# Altium footprint library laboE_altium.PcbLib: 676 footprints (part 25 of 43)
Each footprint in its own frame and in the unit in brackets; x right, y up, seen from the top. Pads: shape width x height; smd on the part's side, far side on the other; paste and mask are expansions set on the pad; w line width, h text height; cw(c..) or ccw(c..) is an arc to the next point about the centre after c.
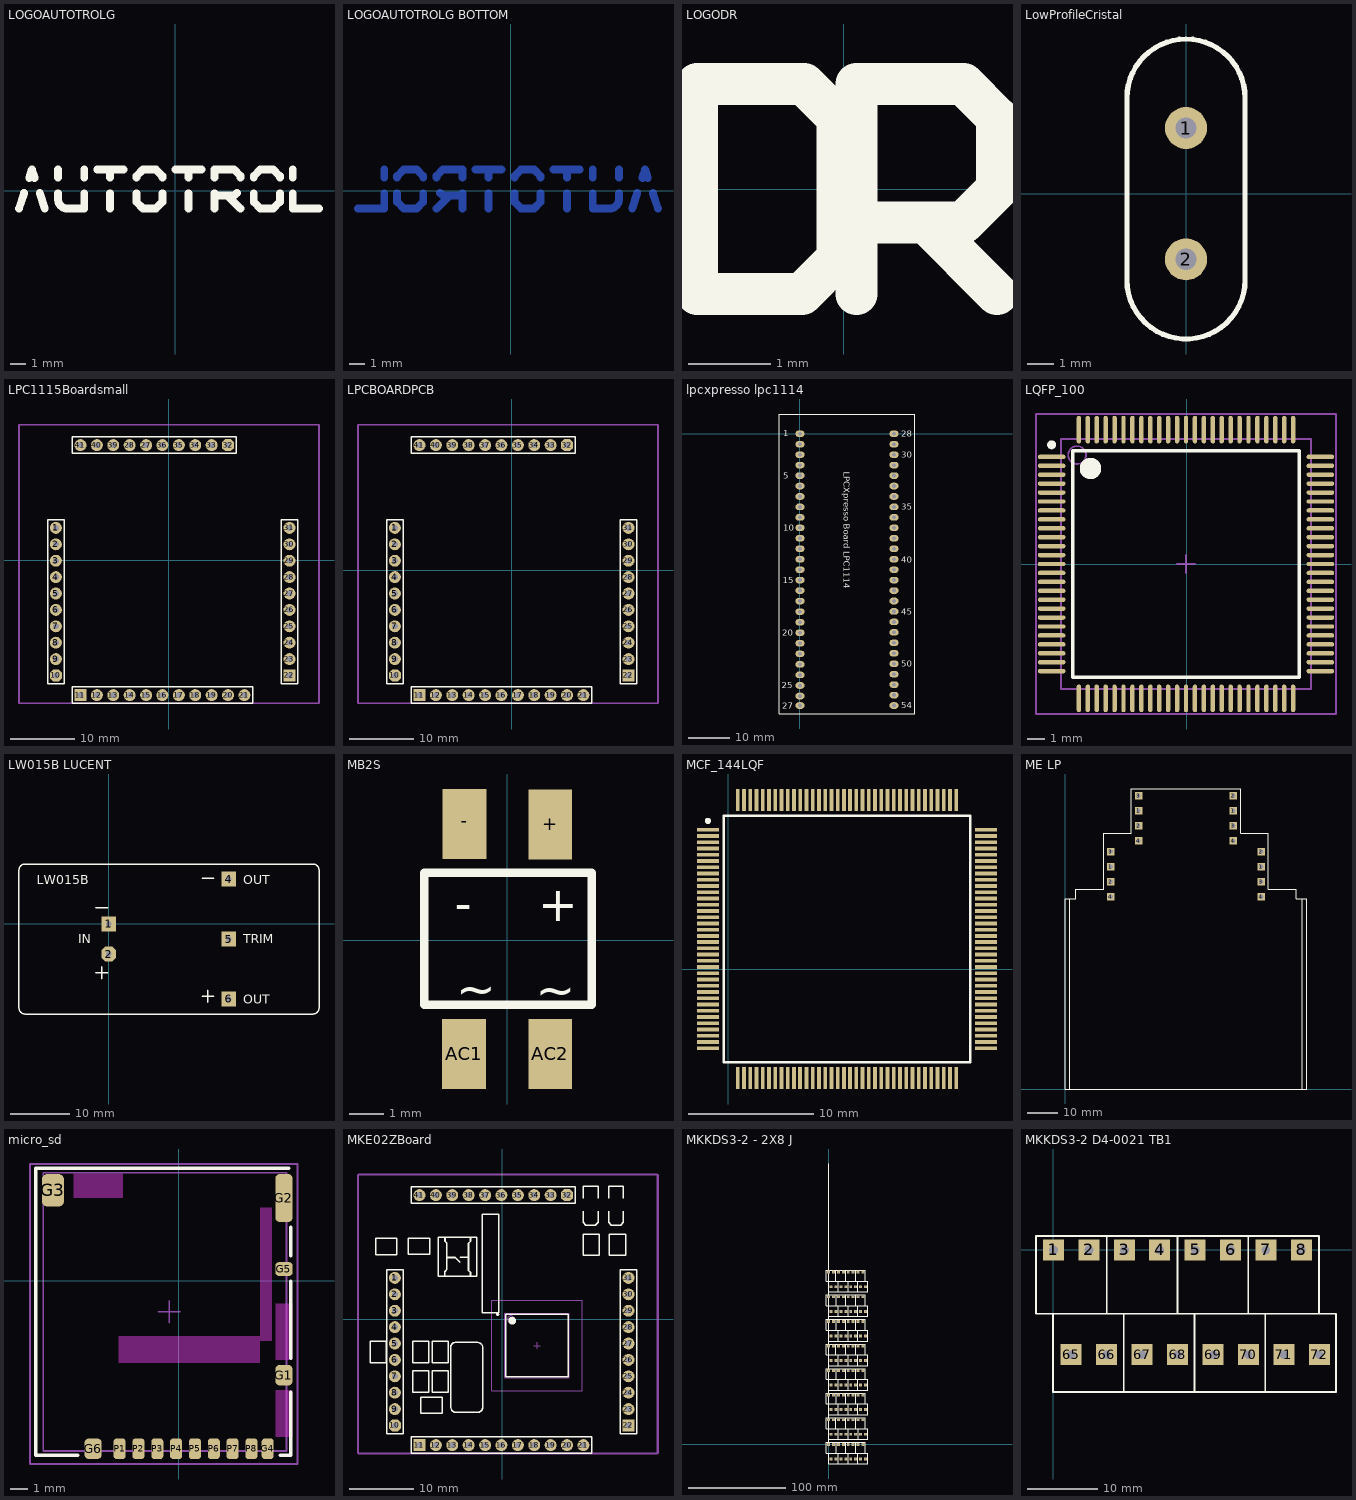
[diagram p24: the footprints below, top view; thin cyan lines are the x and y axes]

## LOGOAUTOTROLG [mm]
Top Overlay:
  lines w0.508: -10.16,-1.143 -9.83,-0.127 ; -9.5,0.838 -9.322,1.397 -9.144,0.838 ; -8.814,-0.127 -8.484,-1.143 ; -7.62,-0.559 -7.62,-0.152 ; -7.62,0.864 -7.62,1.397 ; -7.611,-0.534 ccw(c-7.036,-0.567) -7.036,-1.143 -5.918,-1.143 -5.918,-0.152 ; -5.918,0.864 -5.918,1.397 ; -5.08,1.397 -3.378,1.397 ; -4.242,-1.143 -4.242,-0.152 ; -4.242,0.864 -4.242,1.397 ; -2.54,-0.711 -2.108,-1.143 ; -2.54,-0.686 -2.54,-0.152 ; -2.54,0.864 -2.54,0.94 ; -2.54,0.965 -2.108,1.397 -1.295,1.397 ; -2.083,-1.143 -1.27,-1.143 -0.838,-0.711 ; -1.27,1.397 -0.838,0.965 ; -0.838,-0.686 -0.838,-0.152 ; -0.838,0.864 -0.838,0.94 ; 0,1.397 1.702,1.397 ; 0.838,-1.143 0.838,-0.152 ; 0.838,0.864 0.838,1.397 ; 2.54,-1.143 2.54,-0.152 ; 2.54,-0.305 3.81,-0.305 3.988,-0.127 ; 2.54,0.864 2.54,1.397 3.81,1.397 4.216,0.991 4.216,0.864 ; 3.404,-0.33 4.216,-1.143 ; 5.08,-0.711 5.512,-1.143 ; 5.08,-0.686 5.08,-0.152 ; 5.08,0.864 5.08,0.94 ; 5.08,0.965 5.512,1.397 6.325,1.397 ; 5.537,-1.143 6.35,-1.143 6.782,-0.711 ; 6.35,1.397 6.782,0.965 ; 6.782,-0.686 6.782,-0.152 ; 6.782,0.864 6.782,0.94 ; 7.62,-0.152 7.62,-1.143 9.322,-1.143 ; 7.62,0.864 7.62,1.397

## LOGOAUTOTROLG BOTTOM [mm]
height 23.3
Bottom Layer:
  lines w0.508: -9.922,-1.143 -8.22,-1.143 -8.22,-0.152 ; -8.22,0.864 -8.22,1.397 ; -7.382,-0.711 -6.95,-1.143 -6.137,-1.143 ; -7.382,-0.686 -7.382,-0.152 ; -7.382,0.864 -7.382,0.94 ; -7.382,0.965 -6.95,1.397 ; -6.925,1.397 -6.112,1.397 -5.68,0.965 ; -6.112,-1.143 -5.68,-0.711 ; -5.68,-0.686 -5.68,-0.152 ; -5.68,0.864 -5.68,0.94 ; -4.816,-1.143 -4.004,-0.33 ; -4.816,0.864 -4.816,0.991 -4.41,1.397 -3.14,1.397 -3.14,0.864 ; -4.588,-0.127 -4.41,-0.305 -3.14,-0.305 ; -3.14,-1.143 -3.14,-0.152 ; -2.302,1.397 -0.6,1.397 ; -1.438,-1.143 -1.438,-0.152 ; -1.438,0.864 -1.438,1.397 ; 0.238,-0.711 0.67,-1.143 1.483,-1.143 ; 0.238,-0.686 0.238,-0.152 ; 0.238,0.864 0.238,0.94 ; 0.238,0.965 0.67,1.397 ; 0.695,1.397 1.508,1.397 1.94,0.965 ; 1.508,-1.143 1.94,-0.711 ; 1.94,-0.686 1.94,-0.152 ; 1.94,0.864 1.94,0.94 ; 2.778,1.397 4.48,1.397 ; 3.642,-1.143 3.642,-0.152 ; 3.642,0.864 3.642,1.397 ; 5.318,-0.152 5.318,-1.143 6.436,-1.143 ccw(c6.436,-0.567) 7.011,-0.534 ; 5.318,0.864 5.318,1.397 ; 7.02,-0.559 7.02,-0.152 ; 7.02,0.864 7.02,1.397 ; 7.884,-1.143 8.214,-0.127 ; 8.544,0.838 8.722,1.397 8.9,0.838 ; 9.23,-0.127 9.56,-1.143

## LOGODR [mm]
Top Overlay:
  lines w0.508: -0.508,1.27 -1.778,1.27 -1.778,-1.27 -0.508,-1.27 -0.076,-0.838 -0.076,0.864 -0.483,1.27 ; 0.152,-1.27 0.152,1.27 1.422,1.27 ; 0.356,-0.406 1.448,-0.406 1.854,0 1.854,0.864 1.448,1.27 ; 0.991,-0.406 1.854,-1.27

## LowProfileCristal [mm]
pads (2):
  round 1.6 hole 0.813: 1(0,2.5) 2(0,-2.5)
Top Overlay:
  lines w0.2: -2.25,-3.294 ccw(c0,-3.282) 2.25,-3.29 2.25,3.625 ccw(c0,3.638) -2.25,3.625 -2.25,-3.294
3D body: height 1, standoff 0, extent -2.277,-5.586 2.2,5.916
3D body: height 4, standoff 1, extent -2.044,-5.368 1.98,5.669

## LPC1115Boardsmall [mm]
pads (41):
  round 1.85 hole 0.9 paste+0: 1(-17.45,4.978) 2(-17.45,2.438) 3(-17.45,-0.102) 4(-17.45,-2.642) 5(-17.45,-5.182) 6(-17.45,-7.722) 7(-17.45,-10.262) 8(-17.45,-12.802) 9(-17.45,-15.342) 27(-3.48,17.805) 28(-6.02,17.805) 33(6.68,17.805) 34(4.14,17.805) 35(1.6,17.805) 36(-0.94,17.805) 39(-8.56,17.805) 40(-11.1,17.805) 41(-13.64,17.805)
  oct 1.85x1.85 hole 0.9: 10(-17.45,-17.882)
  rect 1.85x1.85 hole 0.9: 11(-13.64,-20.93) 22(18.745,-17.882)
  round 1.85 hole 0.9: 12(-11.1,-20.93) 13(-8.56,-20.93) 14(-6.02,-20.93) 15(-3.48,-20.93) 16(-0.94,-20.93) 17(1.6,-20.93) 18(4.14,-20.93) 19(6.68,-20.93) 20(9.22,-20.93) 21(11.76,-20.93) 23(18.745,-15.342) 24(18.745,-12.802) 25(18.745,-10.262) 26(18.745,-7.722) 27(18.745,-5.182) 28(18.745,-2.642) 29(18.745,-0.102) 30(18.745,2.438) 31(18.745,4.978)
  oct 1.85x1.85 hole 0.9 paste+0: 32(9.22,17.805)
Top Layer:
  lines w0.5: -17.704,-12.802 cw(c-17.577,-12.802) -17.577,-12.675 ; -17.704,-10.262 cw(c-17.577,-10.262) -17.577,-10.135
Top Overlay:
  lines w0.2: -18.72,-19.152 -18.72,6.248 -16.18,6.248 -16.18,-17.247 -16.18,-19.152 -18.72,-19.152 ; -14.91,-22.2 13.03,-22.2 13.03,-19.66 -13.005,-19.66 -14.91,-19.66 -14.91,-22.2 ; -14.91,16.535 8.585,16.535 10.49,16.535 10.49,19.075 -14.91,19.075 -14.91,16.535 ; 17.475,-19.152 20.015,-19.152 20.015,6.248 17.475,6.248 17.475,-17.247 17.475,-19.152
Mechanical 1:
  lines w0.254: -17.45,-22.2 20.015,-22.2 ; -13.64,17.805 -13.386,17.805 -13.132,18.059 ; -23.165,-22.2 -23.165,20.98 23.317,20.98 23.317,-22.2 -23.165,-22.2
3D body: height 7.35, standoff 7.25, extent 0.435,-3.299 0.835,-2.899
3D body: height 7, standoff 6, extent 5.847,-10.897 6.147,-9.144
3D body: height 7, standoff 6, extent 5.362,-10.884 5.662,-9.131
3D body: height 7, standoff 6, extent 4.854,-10.897 5.154,-9.144
3D body: height 7, standoff 6, extent 4.346,-10.897 4.646,-9.144
3D body: height 7, standoff 6, extent 3.838,-10.897 4.138,-9.144
3D body: height 7, standoff 6, extent 3.358,-10.897 3.658,-9.144
3D body: height 7, standoff 6, extent 2.847,-10.897 3.147,-9.144
3D body: height 7, standoff 6, extent 2.339,-10.897 2.639,-9.144
3D body: height 7, standoff 6, extent 1.857,-10.897 2.157,-9.144
3D body: height 7, standoff 6, extent 1.349,-10.897 1.649,-9.144
3D body: height 7, standoff 6, extent 0.838,-10.897 1.138,-9.144
3D body: height 7, standoff 6, extent 0.356,-10.897 0.656,-9.144
3D body: height 6.25, standoff 6, extent 5.844,-2.007 6.144,-0.254
3D body: height 6.25, standoff 6, extent 5.336,-2.007 5.636,-0.254
3D body: height 6.25, standoff 6, extent 4.854,-2.007 5.154,-0.254
3D body: height 6.25, standoff 6, extent 4.346,-2.007 4.646,-0.254
3D body: height 6.25, standoff 6, extent 3.863,-2.007 4.163,-0.254
3D body: height 6.25, standoff 6, extent 3.355,-2.007 3.655,-0.254
3D body: height 6.25, standoff 6, extent 2.845,-2.007 3.145,-0.254
3D body: height 6.25, standoff 6, extent 2.365,-2.007 2.665,-0.254
3D body: height 6.25, standoff 6, extent 1.857,-2.007 2.157,-0.254
3D body: height 6.25, standoff 6, extent 1.349,-2.007 1.649,-0.254
3D body: height 6.25, standoff 6, extent 0.866,-2.007 1.166,-0.254
3D body: height 6.25, standoff 6, extent 0.335,-2.007 0.635,-0.254
3D body: height 7, standoff 6, extent 6.782,-8.456 8.534,-8.156
3D body: height 7, standoff 6, extent 6.782,-7.976 8.534,-7.676
3D body: height 7, standoff 6, extent 6.782,-7.465 8.534,-7.165
3D body: height 7, standoff 6, extent 6.795,-6.957 8.547,-6.657
3D body: height 7, standoff 6, extent 6.795,-6.475 8.547,-6.175
3D body: height 7, standoff 6, extent 6.794,-5.969 8.547,-5.669
3D body: height 7, standoff 6, extent 6.794,-5.461 8.547,-5.161
3D body: height 7, standoff 6, extent 6.795,-4.951 8.547,-4.651
3D body: height 7, standoff 6, extent 6.795,-4.468 8.547,-4.168
3D body: height 7, standoff 6, extent 6.795,-3.96 8.547,-3.66
3D body: height 7, standoff 6, extent 6.782,-3.454 8.534,-3.154
3D body: height 6.25, standoff 6, extent 6.794,-2.972 8.547,-2.672
3D body: height 7, standoff 6, extent -2.032,-2.972 -0.279,-2.672
3D body: height 7, standoff 6, extent -2.032,-3.454 -0.279,-3.154
3D body: height 7, standoff 6, extent -2.032,-3.962 -0.279,-3.662
3D body: height 7, standoff 6, extent -2.032,-4.468 -0.279,-4.168
3D body: height 7, standoff 6, extent -2.032,-4.953 -0.279,-4.653
3D body: height 7, standoff 6, extent -2.032,-5.459 -0.279,-5.159
3D body: height 7, standoff 6, extent -2.032,-5.967 -0.279,-5.667
3D body: height 7, standoff 6, extent -2.032,-6.475 -0.279,-6.175
3D body: height 7, standoff 6, extent -2.032,-6.957 -0.279,-6.657
3D body: height 7, standoff 6, extent -2.032,-7.465 -0.279,-7.165
3D body: height 7, standoff 6, extent -2.032,-7.95 -0.279,-7.65
3D body: height 7, standoff 6, extent -2.032,-8.453 -0.279,-8.153
3D body: height 11.1, standoff 8.1, extent 3.613,4.325 4.413,5.125
3D body: height 11.1, standoff 8.1, extent 3.613,6.865 4.413,7.665
3D body: height 11.1, standoff 8.1, extent 3.613,9.405 4.413,10.205
3D body: height 11.1, standoff 8.1, extent 3.613,11.945 4.413,12.745
3D body: height 11.1, standoff 8.1, extent 3.613,14.485 4.413,15.285
3D body: height 8, standoff 6, extent 2.876,3.404 5.15,16.002
3D body: height 7, standoff 6, extent -16.972,7.681 -10.962,13.691
3D body: height 8.9, standoff 8.1, extent -15.572,9.202 -12.572,12.201
3D body: height 8.1, standoff 7, extent -16.975,7.671 -10.965,13.681
3D body: height 8.2, standoff 8.1, extent -16.752,12.502 -15.752,13.501
3D body: height 8.2, standoff 8.1, extent -12.202,12.472 -11.202,13.471
3D body: height 8.2, standoff 8.1, extent -12.152,7.942 -11.152,8.941
3D body: height 8.2, standoff 8.1, extent -16.702,7.972 -15.702,8.971
3D body: height 7, standoff 6, extent -3.519,9.127 -0.919,10.727
3D body: height 7, standoff 6, extent -0.919,9.127 -0.619,10.727
3D body: height 7, standoff 6, extent -3.819,9.127 -3.519,10.727
3D body: height -2, standoff -6, extent -10.65,-12.694 -5.499,-1.647
3D body: height 7, standoff 6, extent -17.234,16.886 -15.634,19.486
3D body: height 7, standoff 6, extent -17.234,19.486 -15.634,19.786
3D body: height 7, standoff 6, extent -17.234,16.586 -15.634,16.886
3D body: height 7, standoff 6, extent -3.519,11.667 -0.919,13.267
3D body: height 7, standoff 6, extent -0.919,11.667 -0.619,13.267
3D body: height 7, standoff 6, extent -3.819,11.667 -3.519,13.267
3D body: height 7, standoff 6, extent -15.706,-7.761 -14.106,-5.161
3D body: height 7, standoff 6, extent -15.706,-5.161 -14.106,-4.861
3D body: height 7, standoff 6, extent -15.706,-8.061 -14.106,-7.761
3D body: height 7, standoff 6, extent -20.532,-7.761 -18.932,-5.161
3D body: height 7, standoff 6, extent -20.532,-5.161 -18.932,-4.861
3D body: height 7, standoff 6, extent -20.532,-8.061 -18.932,-7.761
3D body: height 7, standoff 6, extent -12.536,-6.494 -9.936,-4.894
3D body: height 7, standoff 6, extent -9.936,-6.494 -9.636,-4.894
3D body: height 7, standoff 6, extent -12.836,-6.494 -12.536,-4.894
3D body: height 7, standoff 6, extent -12.518,-9.279 -9.918,-7.68
3D body: height 7, standoff 6, extent -12.818,-9.279 -12.518,-7.68
3D body: height 7, standoff 6, extent -9.918,-9.279 -9.618,-7.68
3D body: height 7, standoff 6, extent 17.602,10.16 20.904,11.786
3D body: height 7, standoff 6, extent 17.526,7.353 17.826,8.953
3D body: height 7, standoff 6, extent 20.426,7.353 20.726,8.953
3D body: height 7, standoff 6, extent 17.826,7.353 20.426,8.953
3D body: height 7, standoff 6, extent 17.602,14.605 20.904,16.231
3D body: height 7, standoff 6, extent 17.251,17.387 17.551,18.986
3D body: height 7, standoff 6, extent 14.351,17.387 14.651,18.986
3D body: height 7, standoff 6, extent 14.651,17.387 17.251,18.986
3D body: height 7, standoff 6, extent 16.815,14.586 17.6,16.25
3D body: height 7, standoff 6, extent 20.893,14.586 21.678,16.25
3D body: height 7, standoff 6, extent 16.803,10.141 17.588,11.805
3D body: height 7, standoff 6, extent 20.893,10.141 21.678,11.805
3D body: height 6, standoff 5, extent -23.012,-22.149 23.063,20.879
3D body: height -0.2, standoff -6, extent 17.366,-19.257 20.015,6.248
3D body: height -0.2, standoff -6, extent -18.698,-19.232 -16.049,6.274
3D body: height -0.2, standoff -6, extent -14.81,16.608 10.695,19.257
3D body: height -0.2, standoff -6, extent -15.073,-22.381 13.081,-19.732
3D body: height 7.25, standoff 6, extent -0.249,-9.063 6.751,-2.063

## LPCBOARDPCB [mm]
pads (41):
  round 1.85 hole 0.9 paste+0: 1(-18.098,6.54) 2(-18.098,4) 3(-18.098,1.46) 4(-18.098,-1.079) 5(-18.098,-3.619) 6(-18.098,-6.159) 7(-18.098,-8.7) 8(-18.098,-11.239) 9(-18.098,-13.779) 33(6.032,19.367) 34(3.492,19.367) 35(0.953,19.367) 36(-1.587,19.367) 37(-4.127,19.367) 38(-6.667,19.367) 39(-9.207,19.367) 40(-11.747,19.367) 41(-14.287,19.367)
  oct 1.85x1.85 hole 0.9: 10(-18.098,-16.319)
  rect 1.85x1.85 hole 0.9: 11(-14.287,-19.367) 22(18.098,-16.319)
  round 1.85 hole 0.9: 12(-11.747,-19.367) 13(-9.207,-19.367) 14(-6.667,-19.367) 15(-4.127,-19.367) 16(-1.587,-19.367) 17(0.953,-19.367) 18(3.492,-19.367) 19(6.032,-19.367) 20(8.572,-19.367) 21(11.112,-19.367) 23(18.098,-13.779) 24(18.098,-11.239) 25(18.098,-8.7) 26(18.098,-6.159) 27(18.098,-3.619) 28(18.098,-1.079) 29(18.098,1.46) 30(18.098,4) 31(18.098,6.54)
  oct 1.85x1.85 hole 0.9 paste+0: 32(8.572,19.367)
Top Layer:
  lines w0.5: -18.351,-11.239 cw(c-18.224,-11.239) -18.224,-11.112 ; -18.351,-8.7 cw(c-18.224,-8.7) -18.224,-8.572
Top Overlay:
  lines w0.2: -19.367,-17.59 -16.828,-17.59 -16.828,-15.684 -16.828,7.81 -19.367,7.81 -19.367,-17.59 ; -15.557,-20.637 -15.557,-18.098 -13.652,-18.098 12.383,-18.098 12.383,-20.637 -15.557,-20.637 ; -15.557,18.098 -15.557,20.637 9.842,20.637 9.842,18.098 7.938,18.098 -15.557,18.098 ; 16.828,-17.59 16.828,-15.684 16.828,7.81 19.367,7.81 19.367,-17.59 16.828,-17.59
Mechanical 1:
  lines w0.254: -18.098,-20.637 19.367,-20.637 ; -14.287,19.367 -14.034,19.367 -13.779,19.621 ; -23.812,-20.637 22.669,-20.637 22.669,22.543 -23.812,22.543 -23.812,-20.637
3D body: height -0.2, standoff -6, extent -15.721,-20.819 12.433,-18.17
3D body: height -0.2, standoff -6, extent -15.458,18.17 10.048,20.819
3D body: height -0.2, standoff -6, extent -19.346,-17.67 -16.697,7.836
3D body: height -0.2, standoff -6, extent 16.719,-17.695 19.367,7.81
3D body: height 6, standoff 5, extent -23.66,-20.587 22.415,22.441
3D body: height 7, standoff 6, extent 20.245,11.703 21.03,13.367
3D body: height 7, standoff 6, extent 16.156,11.703 16.941,13.367
3D body: height 7, standoff 6, extent 20.245,16.148 21.03,17.812
3D body: height 7, standoff 6, extent 16.167,16.148 16.952,17.812
3D body: height 7, standoff 6, extent 14.004,18.949 16.603,20.549
3D body: height 7, standoff 6, extent 13.704,18.949 14.004,20.549
3D body: height 7, standoff 6, extent 16.603,18.949 16.903,20.549
3D body: height 7, standoff 6, extent 16.954,16.167 20.256,17.793
3D body: height 7, standoff 6, extent 17.179,8.915 19.778,10.515
3D body: height 7, standoff 6, extent 19.778,8.915 20.078,10.515
3D body: height 7, standoff 6, extent 16.879,8.915 17.179,10.515
3D body: height 7, standoff 6, extent 16.954,11.722 20.256,13.348
3D body: height 7, standoff 6, extent -10.565,-7.717 -10.265,-6.117
3D body: height 7, standoff 6, extent -13.465,-7.717 -13.165,-6.117
3D body: height 7, standoff 6, extent -13.165,-7.717 -10.565,-6.117
3D body: height 7, standoff 6, extent -13.484,-4.932 -13.184,-3.332
3D body: height 7, standoff 6, extent -10.584,-4.932 -10.284,-3.332
3D body: height 7, standoff 6, extent -13.184,-4.932 -10.584,-3.332
3D body: height 7, standoff 6, extent -21.179,-6.499 -19.579,-6.199
3D body: height 7, standoff 6, extent -21.179,-3.599 -19.579,-3.299
3D body: height 7, standoff 6, extent -21.179,-6.199 -19.579,-3.599
3D body: height 7, standoff 6, extent -16.353,-6.499 -14.753,-6.199
3D body: height 7, standoff 6, extent -16.353,-3.599 -14.753,-3.299
3D body: height 7, standoff 6, extent -16.353,-6.199 -14.753,-3.599
3D body: height 7, standoff 6, extent -4.467,13.229 -4.167,14.829
3D body: height 7, standoff 6, extent -1.567,13.229 -1.267,14.829
3D body: height 7, standoff 6, extent -4.167,13.229 -1.567,14.829
3D body: height 7, standoff 6, extent -17.881,18.149 -16.281,18.449
3D body: height 7, standoff 6, extent -17.881,21.048 -16.281,21.348
3D body: height 7, standoff 6, extent -17.881,18.449 -16.281,21.048
3D body: height -2, standoff -6, extent -11.297,-11.132 -6.147,-0.085
3D body: height 7, standoff 6, extent -4.467,10.689 -4.167,12.289
3D body: height 7, standoff 6, extent -1.567,10.689 -1.267,12.289
3D body: height 7, standoff 6, extent -4.167,10.689 -1.567,12.289
3D body: height 8.2, standoff 8.1, extent -17.349,9.534 -16.349,10.534
3D body: height 8.2, standoff 8.1, extent -12.799,9.504 -11.799,10.504
3D body: height 8.2, standoff 8.1, extent -12.849,14.034 -11.849,15.034
3D body: height 8.2, standoff 8.1, extent -17.399,14.064 -16.399,15.064
3D body: height 8.1, standoff 7, extent -17.623,9.233 -11.613,15.243
3D body: height 8.9, standoff 8.1, extent -16.219,10.764 -13.219,13.763
3D body: height 7, standoff 6, extent -17.619,9.243 -11.609,15.254
3D body: height 8, standoff 6, extent 2.228,4.966 4.503,17.564
3D body: height 11.1, standoff 8.1, extent 2.966,16.047 3.766,16.847
3D body: height 11.1, standoff 8.1, extent 2.966,13.507 3.766,14.307
3D body: height 11.1, standoff 8.1, extent 2.966,10.967 3.766,11.767
3D body: height 11.1, standoff 8.1, extent 2.966,8.427 3.766,9.227
3D body: height 11.1, standoff 8.1, extent 2.966,5.887 3.766,6.687
3D body: height 7, standoff 6, extent -2.68,-6.891 -0.927,-6.591
3D body: height 7, standoff 6, extent -2.68,-6.388 -0.927,-6.088
3D body: height 7, standoff 6, extent -2.68,-5.903 -0.927,-5.603
3D body: height 7, standoff 6, extent -2.68,-5.395 -0.927,-5.095
3D body: height 7, standoff 6, extent -2.68,-4.912 -0.927,-4.613
3D body: height 7, standoff 6, extent -2.68,-4.404 -0.927,-4.105
3D body: height 7, standoff 6, extent -2.68,-3.896 -0.927,-3.597
3D body: height 7, standoff 6, extent -2.68,-3.391 -0.927,-3.091
3D body: height 7, standoff 6, extent -2.68,-2.906 -0.927,-2.606
3D body: height 7, standoff 6, extent -2.68,-2.4 -0.927,-2.1
3D body: height 7, standoff 6, extent -2.68,-1.892 -0.927,-1.592
3D body: height 7, standoff 6, extent -2.68,-1.41 -0.927,-1.11
3D body: height 6.25, standoff 6, extent 6.147,-1.41 7.899,-1.11
3D body: height 7, standoff 6, extent 6.134,-1.892 7.887,-1.592
3D body: height 7, standoff 6, extent 6.147,-2.398 7.899,-2.098
3D body: height 7, standoff 6, extent 6.147,-2.906 7.899,-2.606
3D body: height 7, standoff 6, extent 6.147,-3.388 7.899,-3.088
3D body: height 7, standoff 6, extent 6.147,-3.899 7.899,-3.599
3D body: height 7, standoff 6, extent 6.147,-4.407 7.899,-4.107
3D body: height 7, standoff 6, extent 6.147,-4.912 7.9,-4.612
3D body: height 7, standoff 6, extent 6.147,-5.395 7.899,-5.095
3D body: height 7, standoff 6, extent 6.134,-5.903 7.887,-5.603
3D body: height 7, standoff 6, extent 6.134,-6.413 7.887,-6.114
3D body: height 7, standoff 6, extent 6.134,-6.894 7.887,-6.594
3D body: height 6.25, standoff 6, extent -0.313,-0.445 -0.013,1.308
3D body: height 6.25, standoff 6, extent 0.218,-0.445 0.518,1.308
3D body: height 6.25, standoff 6, extent 0.701,-0.445 1.001,1.308
3D body: height 6.25, standoff 6, extent 1.209,-0.445 1.509,1.308
3D body: height 6.25, standoff 6, extent 1.717,-0.445 2.017,1.308
3D body: height 6.25, standoff 6, extent 2.197,-0.445 2.497,1.308
3D body: height 6.25, standoff 6, extent 2.708,-0.445 3.007,1.308
3D body: height 6.25, standoff 6, extent 3.216,-0.445 3.515,1.308
3D body: height 6.25, standoff 6, extent 3.698,-0.445 3.998,1.308
3D body: height 6.25, standoff 6, extent 4.206,-0.445 4.506,1.308
3D body: height 6.25, standoff 6, extent 4.689,-0.445 4.989,1.308
3D body: height 6.25, standoff 6, extent 5.197,-0.445 5.497,1.308
3D body: height 7, standoff 6, extent -0.292,-9.335 0.008,-7.582
3D body: height 7, standoff 6, extent 0.191,-9.335 0.49,-7.582
3D body: height 7, standoff 6, extent 0.701,-9.335 1.001,-7.582
3D body: height 7, standoff 6, extent 1.209,-9.335 1.509,-7.582
3D body: height 7, standoff 6, extent 1.692,-9.335 1.991,-7.582
3D body: height 7, standoff 6, extent 2.2,-9.335 2.499,-7.582
3D body: height 7, standoff 6, extent 2.71,-9.335 3.01,-7.582
3D body: height 7, standoff 6, extent 3.19,-9.335 3.49,-7.582
3D body: height 7, standoff 6, extent 3.698,-9.335 3.998,-7.582
3D body: height 7, standoff 6, extent 4.206,-9.335 4.506,-7.582
3D body: height 7, standoff 6, extent 4.714,-9.322 5.014,-7.569
3D body: height 7, standoff 6, extent 5.199,-9.335 5.499,-7.582
3D body: height 7.35, standoff 7.25, extent -0.213,-1.736 0.188,-1.337
3D body: height 7.25, standoff 6, extent -0.897,-7.501 6.104,-0.5

## lpcxpresso lpc1114 [mm]
pads (54):
  oval 2.2x1.6 hole 0.9: 1(0,0) 2(0,-2.54) 3(0,-5.08) 4(0,-7.62) 5(0,-10.16) 6(0,-12.7) 7(0,-15.24) 8(0,-17.78) 9(0,-20.32) 10(0,-22.86) 11(0,-25.4) 12(0,-27.94) 13(0,-30.48) 14(0,-33.02) 15(0,-35.56) 16(0,-38.1) 17(0,-40.663) 18(0,-43.226) 19(0,-45.789) 20(0,-48.351) 21(0,-50.914) 22(0,-53.477) 23(0,-56.04) 24(0,-58.603) 25(0,-61.166) 26(0,-63.729) 27(0,-66.04) 28(22.86,0) 29(22.86,-2.54) 30(22.86,-5.08) 31(22.86,-7.62) 32(22.86,-10.16) 33(22.86,-12.7) 34(22.86,-15.24) 35(22.86,-17.78) 36(22.86,-20.32) 37(22.86,-22.86) 38(22.86,-25.4) 39(22.86,-27.94) 40(22.86,-30.48) 41(22.86,-33.02) 42(22.86,-35.56) 43(22.86,-38.1) 44(22.86,-40.64) 45(22.86,-43.18) 46(22.86,-45.72) 47(22.86,-48.26) 48(22.86,-50.8) 49(22.86,-53.34) 50(22.86,-55.88) 51(22.86,-58.42) 52(22.86,-60.96) 53(22.86,-63.5) 54(22.86,-66.04)
Top Overlay:
  lines w0.254: -5,-68.097 27.86,-68.097 27.86,4.801 -5,4.801 -5,-68.097
  text "45" at 24.638,-44.018 h1.52
  text "40" at 24.638,-31.344 h1.52
  text "35" at 24.638,-18.491 h1.52
  text "30" at 24.638,-5.842 h1.52
  text "25" at -4.394,-61.849 h1.52
  text "15" at -4.242,-36.297 h1.52
  text "5" at -4.115,-10.973 h1.52
  text "28" at 24.638,-0.787 h1.52
  text "50" at 24.638,-56.667 h1.52
  text "54" at 24.638,-66.7 h1.52
  text "27" at -4.267,-66.827 h1.52
  text "20" at -4.293,-49.124 h1.52
  text "10" at -4.064,-23.52 h1.52
  text "1" at -4.064,-0.61 h1.52
  text "LPCXpresso Board LPC1114" at 10.592,-9.246 h1.52

## LQFP_100 [mm]
pads (100):
  oval 1.55x0.25 smd: 1(-7.576,6.025) 2(-7.576,5.525) 3(-7.576,5.025) 4(-7.576,4.525) 5(-7.576,4.025) 6(-7.576,3.525) 7(-7.576,3.025) 8(-7.576,2.525) 9(-7.576,2.025) 10(-7.576,1.525) 11(-7.576,1.025) 12(-7.576,0.525) 13(-7.576,0.025) 14(-7.576,-0.475) 15(-7.576,-0.975) 16(-7.576,-1.475) 17(-7.576,-1.975) 18(-7.576,-2.475) 19(-7.576,-2.975) 20(-7.576,-3.475) 21(-7.576,-3.975) 22(-7.576,-4.475) 23(-7.576,-4.975) 24(-7.576,-5.475) 25(-7.576,-5.975) 51(7.474,-5.975) 52(7.474,-5.475) 53(7.474,-4.975) 54(7.474,-4.475) 55(7.474,-3.975) 56(7.474,-3.475) 57(7.474,-2.975) 58(7.474,-2.475) 59(7.474,-1.975) 60(7.474,-1.475) 61(7.474,-0.975) 62(7.474,-0.475) 63(7.474,0.025) 64(7.474,0.525) 65(7.474,1.025) 66(7.474,1.525) 67(7.474,2.025) 68(7.474,2.525) 69(7.474,3.025) 70(7.474,3.525) 71(7.474,4.025) 72(7.474,4.525) 73(7.474,5.025) 74(7.474,5.525) 75(7.474,6.025)
  oval 0.25x1.55 smd: 26(-6.051,-7.5) 27(-5.551,-7.5) 28(-5.051,-7.5) 29(-4.551,-7.5) 30(-4.051,-7.5) 31(-3.551,-7.5) 32(-3.051,-7.5) 33(-2.551,-7.5) 34(-2.051,-7.5) 35(-1.551,-7.5) 36(-1.051,-7.5) 37(-0.551,-7.5) 38(-0.051,-7.5) 39(0.449,-7.5) 40(0.949,-7.5) 41(1.449,-7.5) 42(1.949,-7.5) 43(2.449,-7.5) 44(2.949,-7.5) 45(3.449,-7.5) 46(3.949,-7.5) 47(4.449,-7.5) 48(4.949,-7.5) 49(5.449,-7.5) 50(5.949,-7.5) 76(5.949,7.55) 77(5.449,7.55) 78(4.949,7.55) 79(4.449,7.55) 80(3.949,7.55) 81(3.449,7.55) 82(2.949,7.55) 83(2.449,7.55) 84(1.949,7.55) 85(1.449,7.55) 86(0.949,7.55) 87(0.449,7.55) 88(-0.051,7.55) 89(-0.551,7.55) 90(-1.051,7.55) 91(-1.551,7.55) 92(-2.051,7.55) 93(-2.551,7.55) 94(-3.051,7.55) 95(-3.551,7.55) 96(-4.051,7.55) 97(-4.551,7.55) 98(-5.051,7.55) 99(-5.551,7.55) 100(-6.051,7.55)
Top Overlay:
  circle w0.25: c-7.576,6.7 r0.125
  circle w0.6: c-5.401,5.375 r0.3
  lines w0.2: -6.401,-6.325 -6.401,6.375 6.299,6.375 6.299,-6.325 -6.401,-6.325
Mechanical 13:
  circle w0.1: c-6.151,6.125 r0.5
  lines w0.1: -7.051,-6.975 -7.051,7.025 6.949,7.025 6.949,-6.975 -7.051,-6.975
Mechanical 15:
  lines w0.1: -0.551,0.025 0.449,0.025 ; -0.051,-0.475 -0.051,0.525 ; -8.451,-8.375 -8.451,8.425 8.349,8.425 8.349,-8.375 -8.451,-8.375
3D body: height 1.6, standoff 0, extent -7.051,-6.975 6.949,7.025

## LW015B LUCENT [mm]
pads (5):
  rect 2.5x2.5 hole 1: 1(0,0) 4(20.32,7.6) 5(20.32,-2.55) 6(20.32,-12.7)
  oct 2.5x2.5 hole 1: 2(0,-5.09)
Top Overlay:
  lines w0.254: -2.2,-8.25 -0.2,-8.25 ; -2.2,2.75 -0.2,2.75 ; -1.2,-9.25 -1.2,-7.25 ; 15.8,-12.25 17.8,-12.25 ; 15.8,7.75 17.8,7.75 ; 16.8,-13.25 16.8,-11.25 ; -15.2,-14.25 ccw(c-14.2,-14.25) -14.2,-15.25 34.6,-15.25 ccw(c34.6,-14.25) 35.6,-14.25 35.6,9.15 ccw(c34.6,9.15) 34.6,10.15 -14.2,10.15 ccw(c-14.2,9.15) -15.2,9.15 -15.2,-14.25
  text "LW015B" at -12.2,6.75 h1.52
  text "OUT" at 22.8,-13.55 h1.52
  text "OUT" at 22.8,6.75 h1.52
  text "TRIM" at 22.8,-3.25 h1.52
  text "IN" at -5.2,-3.25 h1.52

## MB2S [mm]
pads (4):
  rect 1.27x2.032 smd: +(1.25,3.35) -(-1.232,3.364) AC1(-1.25,-3.3) AC2(1.25,-3.3)
Top Overlay:
  lines w0.254: -2.4,-1.875 -2.4,1.95 2.45,1.95 2.45,-1.875 -2.4,-1.875
  text "+" at 0.9,0.55 h1
  text "-" at -1.525,0.575 h1
  text "~" at 0.825,-1.925 h1
  text "~" at -1.475,-1.9 h1

## MCF_144LQF [mm]
pads (144):
  rect 1.75x0.3 smd: 1(-1.627,11.18) 2(-1.627,10.68) 3(-1.627,10.18) 4(-1.627,9.68) 5(-1.627,9.18) 6(-1.627,8.68) 7(-1.627,8.18) 8(-1.627,7.68) 9(-1.627,7.18) 10(-1.627,6.68) 11(-1.627,6.18) 12(-1.627,5.68) 13(-1.627,5.18) 14(-1.627,4.68) 15(-1.627,4.18) 16(-1.627,3.68) 17(-1.627,3.18) 18(-1.627,2.68) 19(-1.627,2.18) 20(-1.627,1.68) 21(-1.627,1.18) 22(-1.627,0.68) 23(-1.627,0.18) 24(-1.627,-0.32) 25(-1.627,-0.82) 26(-1.627,-1.32) 27(-1.627,-1.82) 28(-1.627,-2.32) 29(-1.627,-2.82) 30(-1.627,-3.32) 31(-1.627,-3.82) 32(-1.627,-4.32) 33(-1.627,-4.82) 34(-1.627,-5.32) 35(-1.627,-5.82) 36(-1.627,-6.32) 73(20.623,-6.32) 74(20.623,-5.82) 75(20.623,-5.32) 76(20.623,-4.82) 77(20.623,-4.32) 78(20.623,-3.82) 79(20.623,-3.32) 80(20.623,-2.82) 81(20.623,-2.32) 82(20.623,-1.82) 83(20.623,-1.32) 84(20.623,-0.82) 85(20.623,-0.32) 86(20.623,0.18) 87(20.623,0.68) 88(20.623,1.18) 89(20.623,1.68) 90(20.623,2.18) 91(20.623,2.68) 92(20.623,3.18) 93(20.623,3.68) 94(20.623,4.18) 95(20.623,4.68) 96(20.623,5.18) 97(20.623,5.68) 98(20.623,6.18) 99(20.623,6.68) 100(20.623,7.18) 101(20.623,7.68) 102(20.623,8.18) 103(20.623,8.68) 104(20.623,9.18) 105(20.623,9.68) 106(20.623,10.18) 107(20.623,10.68) 108(20.623,11.18)
  rect 0.3x1.75 smd: 37(0.748,-8.695) 38(1.248,-8.695) 39(1.748,-8.695) 40(2.248,-8.695) 41(2.748,-8.695) 42(3.248,-8.695) 43(3.748,-8.695) 44(4.248,-8.695) 45(4.748,-8.695) 46(5.248,-8.695) 47(5.748,-8.695) 48(6.248,-8.695) 49(6.748,-8.695) 50(7.248,-8.695) 51(7.748,-8.695) 52(8.248,-8.695) 53(8.748,-8.695) 54(9.248,-8.695) 55(9.748,-8.695) 56(10.248,-8.695) 57(10.748,-8.695) 58(11.248,-8.695) 59(11.748,-8.695) 60(12.248,-8.695) 61(12.748,-8.695) 62(13.248,-8.695) 63(13.748,-8.695) 64(14.248,-8.695) 65(14.748,-8.695) 66(15.248,-8.695) 67(15.748,-8.695) 68(16.248,-8.695) 69(16.748,-8.695) 70(17.248,-8.695) 71(17.748,-8.695) 72(18.248,-8.695) 109(18.248,13.555) 110(17.748,13.555) 111(17.248,13.555) 112(16.748,13.555) 113(16.248,13.555) 114(15.748,13.555) 115(15.248,13.555) 116(14.748,13.555) 117(14.248,13.555) 118(13.748,13.555) 119(13.248,13.555) 120(12.748,13.555) 121(12.248,13.555) 122(11.748,13.555) 123(11.248,13.555) 124(10.748,13.555) 125(10.248,13.555) 126(9.748,13.555) 127(9.248,13.555) 128(8.748,13.555) 129(8.248,13.555) 130(7.748,13.555) 131(7.248,13.555) 132(6.748,13.555) 133(6.248,13.555) 134(5.748,13.555) 135(5.248,13.555) 136(4.748,13.555) 137(4.248,13.555) 138(3.748,13.555) 139(3.248,13.555) 140(2.748,13.555) 141(2.248,13.555) 142(1.748,13.555) 143(1.248,13.555) 144(0.748,13.555)
Top Overlay:
  circle w0.25: c-1.632,11.88 r0.125
  lines w0.2: -0.352,-7.42 19.348,-7.42 19.348,12.28 -0.352,12.28 -0.352,-7.42
3D body: height 2, standoff 0, extent -0.352,-7.419 19.347,12.28

## ME LP [mm]
pads (16):
  rect 2.5x2.5 hole 1.4: 1(15.1,73.6) 1(24.3,92.1) 1(55.7,92.1) 1(64.9,73.6) 2(15.1,68.6) 2(24.3,87.1) 2(55.7,97.1) 2(64.9,78.6) 3(15.1,78.6) 3(24.3,97.1) 3(55.7,87.1) 3(64.9,68.6) 4(15.1,63.6) 4(24.3,82.1) 4(55.7,82.1) 4(64.9,63.6)
Top Overlay:
  lines w0.254: 1.5,0 1.5,63.05 ; 78.5,0 78.5,63.05 ; 0,0 40,0 80,0 80,63.05 76.5,63.05 76.5,66.1 67.3,66.1 67.3,84.7 58.1,84.7 58.1,99.3 40,99.3 21.9,99.3 21.9,84.7 12.7,84.7 12.7,66.1 3.5,66.1 3.5,63.05 0,63.05 0,0

## micro_sd [mm]
pads (14):
  rrect50% 1x1.2 smd: G1(6.145,-5.518) G6(-5.005,-9.818)
  rrect50% 1x2.8 smd: G2(6.145,4.832)
  rrect50% 1.3x1.9 smd: G3(-7.355,5.282)
  rrect50% 0.7x1.2 smd: G4(5.195,-9.818) P1(-3.455,-9.818) P2(-2.355,-9.818) P3(-1.255,-9.818) P4(-0.155,-9.818) P5(0.945,-9.818) P6(2.045,-9.818) P7(3.145,-9.818) P8(4.245,-9.818)
  rrect50% 1x0.8 smd: G5(6.145,0.682)
Top Layer keep-out:
  region: -3.26,6.258 -6.16,6.258 -6.16,4.833 -3.26,4.833
  region: 5.44,4.283 4.74,4.283 4.74,-3.517 5.44,-3.517
  region: 6.64,-1.317 5.64,-1.317 5.64,-4.637 6.64,-4.637
  region: 6.64,-6.387 5.64,-6.387 5.64,-9.137 6.64,-9.137
  region: 4.74,-3.217 -3.51,-3.217 -3.51,-4.817 4.74,-4.817
Top Overlay:
  lines w0.2: -8.36,-10.199 -8.36,6.565 ; -8.307,-10.199 -5.894,-10.199 ; -8.307,6.565 -8.18,6.565 6.425,6.565 ; 5.917,-10.199 6.552,-10.199 6.552,-6.516 ; 6.552,-4.517 6.552,-0.039 ; 6.552,1.458 6.552,3.136
Mechanical 11:
  lines w0.1: -7.926,-9.945 -7.926,6.311 -7.799,6.311 6.298,6.311 6.298,-9.945 -7.926,-9.945
  text "1" at -3.354,-9.31 h1
Mechanical 15:
  lines w0.1: -1.195,-1.817 0.075,-1.817 ; -0.56,-2.452 -0.56,-1.182 ; -8.688,-10.707 6.933,-10.707 6.933,6.819 -8.688,6.819 -8.688,-10.707
3D body "User Library-Micro_SD.step": height 1.6, standoff 0.63, extent -5.66,-7.317 5.34,7.683
3D body "DM3AT-SF-PEJM5.stp": height 1.68, standoff 0, extent -7.612,-10.072 6.238,6.078

## MKE02ZBoard [mm]
pads (41):
  round 1.85 hole 0.9 paste+0: 1(-16.601,6.409) 2(-16.601,3.869) 3(-16.601,1.329) 4(-16.601,-1.211) 5(-16.601,-3.751) 6(-16.601,-6.291) 7(-16.601,-8.831) 8(-16.601,-11.371) 9(-16.601,-13.911) 33(7.529,19.236) 34(4.989,19.236) 35(2.449,19.236) 36(-0.091,19.236) 37(-2.631,19.236) 38(-5.171,19.236) 39(-7.711,19.236) 40(-10.251,19.236) 41(-12.791,19.236)
  oct 1.85x1.85 hole 0.9: 10(-16.601,-16.451)
  rect 1.85x1.85 hole 0.9: 11(-12.791,-19.499) 22(19.594,-16.451)
  round 1.85 hole 0.9: 12(-10.251,-19.499) 13(-7.711,-19.499) 14(-5.171,-19.499) 15(-2.631,-19.499) 16(-0.091,-19.499) 17(2.449,-19.499) 18(4.989,-19.499) 19(7.529,-19.499) 20(10.069,-19.499) 21(12.609,-19.499) 23(19.594,-13.911) 24(19.594,-11.371) 25(19.594,-8.831) 26(19.594,-6.291) 27(19.594,-3.751) 28(19.594,-1.211) 29(19.594,1.329) 30(19.594,3.869) 31(19.594,6.409)
  oct 1.85x1.85 hole 0.9 paste+0: 32(10.069,19.236)
Top Layer:
  lines w0.35: -17.044,-6.735 -16.601,-6.291 -15.839,-6.291 ; -16.601,-1.211 -16.537,-1.275 ; -5.171,-19.499 -5.171,-19.245 ; 2.449,-19.499 2.449,-18.864 ; 4.989,-19.499 4.989,-18.991 ; 18.959,-16.451 19.594,-16.451 ; 18.959,-8.831 19.594,-8.831 ; 19.34,1.329 19.594,1.329
  lines w0.5: -16.855,-11.371 cw(c-16.728,-11.371) -16.728,-11.244 ; -16.855,-8.831 cw(c-16.728,-8.831) -16.728,-8.704
  lines w1: 19.531,6.345 19.594,6.409
Top Overlay:
  circle w0.25: c-0.666,0.756 r0.125
  circle w0.6: c1.584,-0.219 r0.3
  lines w0.2: -7.94,-4.37 cw(c-7.158,-4.338) -7.158,-3.555 -3.788,-3.555 -3.756,-3.587 cw(c-3.773,-4.37) -2.99,-4.37 -2.99,-13.62 cw(c-3.773,-13.62) -3.805,-14.402 ; -7.94,-4.07 -7.94,-13.62 ccw(c-7.158,-13.62) -7.158,-14.402 -3.84,-14.402 ; -3.918,6.666 -9.893,6.666 -9.893,12.716 -3.893,12.716 -3.893,6.691 ; 12.575,16.749 12.575,15.049 12.975,14.549 14.475,14.549 14.875,15.049 14.875,16.749 ; 12.575,18.749 12.575,20.649 14.875,20.649 14.875,18.749 ; 16.512,16.749 16.512,15.049 16.912,14.549 18.412,14.549 18.812,15.049 18.812,16.749 ; 16.512,18.749 16.512,20.649 18.812,20.649 18.812,18.749 ; -20.454,-6.735 -20.454,-3.435 -19.204,-3.435 -17.954,-3.435 -17.954,-6.735 -20.454,-6.735 ; -19.594,10.038 -19.594,11.288 -19.594,12.538 -16.294,12.538 -16.294,10.038 -19.594,10.038 ; -17.871,-17.721 -17.871,7.679 -15.331,7.679 -15.331,-15.816 -15.331,-17.721 -17.871,-17.721 ; -14.504,10.048 -14.504,12.548 -11.204,12.548 -11.204,11.298 -11.204,10.048 -14.504,10.048 ; -14.061,-20.769 13.879,-20.769 13.879,-18.229 -12.156,-18.229 -14.061,-18.229 -14.061,-20.769 ; -14.061,17.966 9.434,17.966 11.339,17.966 11.339,20.506 -14.061,20.506 -14.061,17.966 ; -13.85,-11.307 -13.85,-8.007 -12.6,-8.007 -11.35,-8.007 -11.35,-11.307 -13.85,-11.307 ; -13.85,-6.735 -13.85,-3.435 -11.35,-3.435 -11.35,-6.735 -12.6,-6.735 -13.85,-6.735 ; -12.589,-14.58 -12.589,-12.08 -9.289,-12.08 -9.289,-13.33 -9.289,-14.58 -12.589,-14.58 ; -10.802,-11.307 -10.802,-8.007 -9.552,-8.007 -8.302,-8.007 -8.302,-11.307 -10.802,-11.307 ; -10.802,-6.735 -10.802,-3.435 -8.302,-3.435 -8.302,-6.735 -9.552,-6.735 -10.802,-6.735 ; -3.075,1.011 -0.535,1.011 -0.535,16.251 -3.075,16.251 -3.075,1.011 ; 0.584,-8.919 0.584,0.781 10.284,0.781 10.284,-8.919 0.584,-8.919 ; 12.576,9.892 12.576,13.192 15.076,13.192 15.076,9.892 13.826,9.892 12.576,9.892 ; 16.64,9.892 16.64,13.192 19.14,13.192 19.14,9.892 17.89,9.892 16.64,9.892 ; 18.324,-17.721 20.864,-17.721 20.864,7.679 18.324,7.679 18.324,-15.816 18.324,-17.721
  lines w0.254: -8.893,6.666 -8.893,7.366 -8.543,7.716 -8.543,11.816 -8.843,12.116 -8.843,12.716 ; -8.543,9.566 -7.243,9.566 -6.543,8.866 ; -6.443,9.616 -5.193,9.616 ; -4.893,6.666 -4.893,7.266 -5.193,7.566 -5.193,11.766 -4.893,12.066 -4.893,12.716
Mechanical 1:
  circle w0.1: c1.334,0.031 r0.5
  lines w0.1: 0.434,-9.069 0.434,0.931 10.434,0.931 10.434,-9.069 0.434,-9.069
  lines w0.254: -16.601,-20.769 20.864,-20.769 ; -12.791,19.236 -12.537,19.236 -12.283,19.49 ; -22.316,-20.769 -22.316,22.411 24.166,22.411 24.166,-20.769 -22.316,-20.769 ; -22.252,-20.833 24.039,-20.833 24.039,22.474 -22.189,22.474 -22.252,22.411 -22.252,-20.833
Mechanical 15:
  lines w0.1: 4.934,-4.069 5.934,-4.069 ; 5.434,-4.569 5.434,-3.569 ; -1.566,-11.069 -1.566,2.931 12.434,2.931 12.434,-11.069 -1.566,-11.069
3D body: height 7.35, standoff 7.25, extent 1.284,-1.868 1.684,-1.468
3D body: height 7, standoff 6, extent 6.696,-9.466 6.996,-7.714
3D body: height 7, standoff 6, extent 6.211,-9.453 6.511,-7.701
3D body: height 7, standoff 6, extent 5.703,-9.466 6.003,-7.714
3D body: height 7, standoff 6, extent 5.195,-9.466 5.495,-7.714
3D body: height 7, standoff 6, extent 4.687,-9.466 4.987,-7.714
3D body: height 7, standoff 6, extent 4.207,-9.466 4.507,-7.714
3D body: height 7, standoff 6, extent 3.696,-9.466 3.996,-7.714
3D body: height 7, standoff 6, extent 3.188,-9.466 3.488,-7.714
3D body: height 7, standoff 6, extent 2.706,-9.466 3.006,-7.714
3D body: height 7, standoff 6, extent 2.198,-9.466 2.498,-7.714
3D body: height 7, standoff 6, extent 1.687,-9.466 1.987,-7.714
3D body: height 7, standoff 6, extent 1.205,-9.466 1.505,-7.714
3D body: height 6.25, standoff 6, extent 6.693,-0.576 6.993,1.176
3D body: height 6.25, standoff 6, extent 6.185,-0.576 6.485,1.176
3D body: height 6.25, standoff 6, extent 5.703,-0.576 6.003,1.176
3D body: height 6.25, standoff 6, extent 5.195,-0.576 5.495,1.176
3D body: height 6.25, standoff 6, extent 4.712,-0.576 5.012,1.176
3D body: height 6.25, standoff 6, extent 4.204,-0.576 4.504,1.176
3D body: height 6.25, standoff 6, extent 3.694,-0.576 3.994,1.176
3D body: height 6.25, standoff 6, extent 3.214,-0.576 3.514,1.176
3D body: height 6.25, standoff 6, extent 2.706,-0.576 3.006,1.176
3D body: height 6.25, standoff 6, extent 2.198,-0.576 2.498,1.176
3D body: height 6.25, standoff 6, extent 1.715,-0.576 2.015,1.176
3D body: height 6.25, standoff 6, extent 1.184,-0.576 1.484,1.176
3D body: height 7, standoff 6, extent 7.631,-7.025 9.383,-6.725
3D body: height 7, standoff 6, extent 7.631,-6.545 9.383,-6.245
3D body: height 7, standoff 6, extent 7.631,-6.035 9.383,-5.735
3D body: height 7, standoff 6, extent 7.644,-5.527 9.396,-5.227
3D body: height 7, standoff 6, extent 7.644,-5.044 9.396,-4.744
3D body: height 7, standoff 6, extent 7.644,-4.539 9.396,-4.239
3D body: height 7, standoff 6, extent 7.644,-4.031 9.396,-3.731
3D body: height 7, standoff 6, extent 7.644,-3.52 9.396,-3.22
3D body: height 7, standoff 6, extent 7.644,-3.038 9.396,-2.738
3D body: height 7, standoff 6, extent 7.644,-2.53 9.396,-2.23
3D body: height 7, standoff 6, extent 7.631,-2.024 9.383,-1.724
3D body: height 6.25, standoff 6, extent 7.644,-1.541 9.396,-1.241
3D body: height 7, standoff 6, extent -1.183,-1.541 0.57,-1.241
3D body: height 7, standoff 6, extent -1.183,-2.024 0.57,-1.724
3D body: height 7, standoff 6, extent -1.183,-2.532 0.57,-2.232
3D body: height 7, standoff 6, extent -1.183,-3.038 0.57,-2.738
3D body: height 7, standoff 6, extent -1.183,-3.523 0.57,-3.223
3D body: height 7, standoff 6, extent -1.183,-4.028 0.57,-3.728
3D body: height 7, standoff 6, extent -1.183,-4.536 0.57,-4.236
3D body: height 7, standoff 6, extent -1.183,-5.044 0.57,-4.744
3D body: height 7, standoff 6, extent -1.183,-5.527 0.57,-5.227
3D body: height 7, standoff 6, extent -1.183,-6.035 0.57,-5.735
3D body: height 7, standoff 6, extent -1.183,-6.52 0.57,-6.22
3D body: height 7, standoff 6, extent -1.183,-7.023 0.57,-6.723
3D body: height 7, standoff 6, extent -16.123,9.112 -10.113,15.122
3D body: height 8.9, standoff 8.1, extent -14.723,10.632 -11.723,13.632
3D body: height 8.1, standoff 7, extent -16.126,9.101 -10.116,15.111
3D body: height 8.2, standoff 8.1, extent -15.903,13.932 -14.903,14.932
3D body: height 8.2, standoff 8.1, extent -11.353,13.902 -10.353,14.902
3D body: height 8.2, standoff 8.1, extent -11.303,9.372 -10.303,10.372
3D body: height 8.2, standoff 8.1, extent -15.853,9.402 -14.853,10.402
3D body: height 7, standoff 6, extent -2.67,10.558 -0.07,12.158
3D body: height 7, standoff 6, extent -0.07,10.558 0.23,12.158
3D body: height 7, standoff 6, extent -2.97,10.558 -2.67,12.158
3D body: height -2, standoff -6, extent -9.801,-11.264 -4.65,-0.217
3D body: height 7, standoff 6, extent -16.385,18.317 -14.785,20.917
3D body: height 7, standoff 6, extent -16.385,20.917 -14.785,21.217
3D body: height 7, standoff 6, extent -16.385,18.017 -14.785,18.317
3D body: height 7, standoff 6, extent -2.67,13.098 -0.07,14.698
3D body: height 7, standoff 6, extent -0.07,13.098 0.23,14.698
3D body: height 7, standoff 6, extent -2.97,13.098 -2.67,14.698
3D body: height 7, standoff 6, extent -14.857,-6.33 -13.257,-3.73
3D body: height 7, standoff 6, extent -14.857,-3.73 -13.257,-3.43
3D body: height 7, standoff 6, extent -14.857,-6.63 -13.257,-6.33
3D body: height 7, standoff 6, extent -19.683,-6.33 -18.083,-3.73
3D body: height 7, standoff 6, extent -19.683,-3.73 -18.083,-3.43
3D body: height 7, standoff 6, extent -19.683,-6.63 -18.083,-6.33
3D body: height 7, standoff 6, extent -11.687,-5.063 -9.087,-3.463
3D body: height 7, standoff 6, extent -9.087,-5.063 -8.787,-3.463
3D body: height 7, standoff 6, extent -11.987,-5.063 -11.687,-3.463
3D body: height 7, standoff 6, extent -11.669,-7.849 -9.069,-6.249
3D body: height 7, standoff 6, extent -11.969,-7.849 -11.669,-6.249
3D body: height 7, standoff 6, extent -9.069,-7.849 -8.769,-6.249
3D body: height 6, standoff 5, extent -22.163,-20.718 23.912,22.309
3D body: height -0.2, standoff -6, extent 18.215,-17.827 20.864,7.679
3D body: height -0.2, standoff -6, extent -17.849,-17.801 -15.2,7.704
3D body: height -0.2, standoff -6, extent -13.961,18.038 11.544,20.687
3D body: height -0.2, standoff -6, extent -14.224,-20.951 13.93,-18.302
3D body: height 1, standoff 0, extent -13.42,-11.237 -11.82,-10.937
3D body: height 1, standoff 0, extent -13.42,-8.337 -11.82,-8.037
3D body: height 1, standoff 0, extent -13.42,-10.937 -11.82,-8.337
3D body: height 1, standoff 0, extent -10.372,-11.237 -8.772,-10.937
3D body: height 1, standoff 0, extent -10.372,-8.337 -8.772,-8.037
3D body: height 1, standoff 0, extent -10.372,-10.937 -8.772,-8.337
3D body: height 1, standoff 0, extent -13.38,-3.805 -11.78,-3.505
3D body: height 1, standoff 0, extent -13.38,-6.705 -11.78,-6.405
3D body: height 1, standoff 0, extent -13.38,-6.405 -11.78,-3.805
3D body: height 1, standoff 0, extent -20.024,-6.665 -18.424,-6.365
3D body: height 1, standoff 0, extent -20.024,-3.765 -18.424,-3.465
3D body: height 1, standoff 0, extent -20.024,-6.365 -18.424,-3.765
3D body: height 1, standoff 0, extent -10.332,-3.805 -8.732,-3.505
3D body: height 1, standoff 0, extent -10.332,-6.705 -8.732,-6.405
3D body: height 1, standoff 0, extent -10.332,-6.405 -8.732,-3.805
3D body: height 1, standoff 0, extent -14.434,10.518 -14.134,12.118
3D body: height 1, standoff 0, extent -11.534,10.518 -11.234,12.118
3D body: height 1, standoff 0, extent -14.134,10.518 -11.534,12.118
3D body: height 6, standoff 5, extent 12.901,16.124 14.527,19.426
3D body: height 6, standoff 5, extent 16.838,16.124 18.464,19.426
3D body: height 1, standoff 0, extent -12.249,-14.14 -9.649,-12.54
3D body: height 1, standoff 0, extent -9.649,-14.14 -9.349,-12.54
3D body: height 1, standoff 0, extent -12.549,-14.14 -12.249,-12.54
3D body: height 1, standoff 0, extent -19.234,10.498 -16.634,12.098
3D body: height 1, standoff 0, extent -19.534,10.498 -19.234,12.098
3D body: height 1, standoff 0, extent -16.634,10.498 -16.334,12.098
3D body: height 6, standoff 5, extent 13.016,10.252 14.616,12.852
3D body: height 6, standoff 5, extent 13.016,9.952 14.616,10.252
3D body: height 6, standoff 5, extent 13.016,12.852 14.616,13.152
3D body: height 6, standoff 5, extent 17.08,10.252 18.68,12.852
3D body: height 6, standoff 5, extent 17.08,9.952 18.68,10.252
3D body: height 6, standoff 5, extent 17.08,12.852 18.68,13.152
3D body: height 2.2, standoff 2.1, extent -5.162,6.97 -4.164,7.966
3D body: height 2.2, standoff 2.1, extent -5.132,11.52 -4.134,12.516
3D body: height 2.2, standoff 2.1, extent -9.662,11.47 -8.664,12.466
3D body: height 2.2, standoff 2.1, extent -9.692,6.92 -8.694,7.916
3D body: height 2.1, standoff 2, extent -9.883,6.696 -3.873,12.706
3D body: height 2.35, standoff 2.1, extent -8.39,8.108 -5.396,11.096
3D body: height 2, standoff 0, extent -9.883,6.696 -3.873,12.706
3D body: height 10, standoff 0, extent -8.041,-14.502 -2.89,-3.455
3D body: height 7.25, standoff 6, extent 0.6,-7.632 7.6,-0.632
3D body: height 2.45, standoff 0, extent 0.434,-9.069 10.434,0.931

## MKKDS3-2 - 2X8 J [mm]
pads (128):
  rect 3x3 hole 1.25: 1(0,0) 2(5.08,0) 3(10.16,0) 4(15.2,0) 5(20.28,0) 6(25.36,0) 7(30.4,0) 8(35.48,0) 9(0,25.4) 10(5.04,25.4) 11(10.12,25.4) 12(15.2,25.4) 13(20.24,25.4) 14(25.32,25.4) 15(30.4,25.4) 16(35.44,25.4) 17(0,50.8) 18(5.08,50.8) 19(10.12,50.8) 20(15.2,50.8) 21(20.28,50.8) 22(25.32,50.8) 23(30.4,50.8) 24(35.48,50.8) 25(0,76.2) 26(5.08,76.2) 27(10.16,76.2) 28(15.2,76.2) 29(20.28,76.2) 30(25.36,76.2) 31(30.4,76.2) 32(35.48,76.2) 33(0,101.6) 34(5.04,101.6) 35(10.12,101.6) 36(15.2,101.6) 37(20.24,101.6) 38(25.32,101.6) 39(30.4,101.6) 40(35.44,101.6) 41(0,127) 42(5.092,127) 43(10.12,127) 44(15.2,127) 45(20.28,127) 46(25.32,127) 47(30.4,127) 48(35.48,127) 49(0,152.4) 50(5.08,152.4) 51(10.16,152.4) 52(15.2,152.4) 53(20.28,152.4) 54(25.36,152.4) 55(30.4,152.4) 56(35.48,152.4) 57(0,177.8) 58(5.04,177.8) 59(10.12,177.8) 60(15.2,177.8) 61(20.24,177.8) 62(25.32,177.8) 63(30.4,177.8) 64(35.44,177.8) 65(2.54,-15) 66(7.62,-15) 67(12.7,-15) 68(17.78,-15) 69(22.86,-15) 70(27.9,-15) 71(32.98,-15) 72(38.06,-15) 73(2.58,10.4) 74(7.62,10.4) 75(12.7,10.4) 76(17.78,10.4) 77(22.82,10.4) 78(27.9,10.4) 79(32.98,10.4) 80(37.966,10.414) 81(2.58,35.8) 82(7.66,35.8) 83(12.7,35.8) 84(17.78,35.8) 85(22.86,35.8) 86(27.9,35.8) 87(32.98,35.8) 88(38.06,35.8) 89(2.58,61.2) 90(7.66,61.2) 91(12.74,61.2) 92(17.78,61.2) 93(22.86,61.2) 94(27.94,61.2) 95(32.98,61.2) 96(38.06,61.2) 97(2.58,86.6) 98(7.62,86.6) 99(12.7,86.6) 100(17.78,86.6) 101(22.82,86.6) 102(27.9,86.6) 103(32.98,86.6) 104(38.02,86.6) 105(2.58,112) 106(7.66,112) 107(12.7,112) 108(17.78,112) 109(22.86,112) 110(27.9,112) 111(32.98,112) 112(38.06,112) 113(2.58,137.4) 114(7.66,137.4) 115(12.74,137.4) 116(17.78,137.4) 117(22.86,137.4) 118(27.94,137.4) 119(32.98,137.4) 120(38.06,137.4) 121(2.58,162.8) 122(7.62,162.8) 123(12.7,162.8) 124(17.78,162.8) 125(22.82,162.8) 126(27.9,162.8) 127(32.98,162.8) 128(38.02,162.8)
Top Overlay:
  drawing of 163 lines, arcs and shapes, not listed

## MKKDS3-2 D4-0021 TB1 [mm]
pads (16):
  rect 3x3 hole 1.25: 1(0,0) 2(5.08,0) 3(10.16,0) 4(15.2,0) 5(20.28,0) 6(25.36,0) 7(30.4,0) 8(35.48,0) 65(2.54,-15) 66(7.62,-15) 67(12.7,-15) 68(17.78,-15) 69(22.86,-15) 70(27.9,-15) 71(32.98,-15) 72(38.06,-15)
Top Overlay:
  lines w0.254: -0.073,-9.144 -0.073,-20.32 15.127,-20.32 30.327,-20.32 ; 7.62,-9.144 7.62,1.98 ; 10.047,-20.32 10.047,-9.144 ; 12.7,-9.144 30.327,-9.144 30.327,-20.32 ; 15.127,-9.144 -2.5,-9.144 -2.5,1.98 12.7,1.98 27.9,1.98 ; 17.74,-9.144 17.74,1.98 ; 20.207,-20.32 20.207,-9.144 ; 38.02,-9.144 38.02,1.98 27.9,1.98 ; 27.9,1.98 27.9,-9.144 40.447,-9.144 40.447,-20.32 30.327,-20.32